# Altium schematic symbol library SFH213FA.SchLib: 1 symbol
Pins are listed as number, name and electrical type; pins without a type are passive.

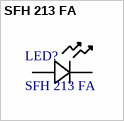
[diagram p0: symbol SFH 213 FA]

## SFH 213 FA
designator LED?
Description; Manufacturer_Name: ams OSRAM; Copyright: Copyright (C) 2026 Ultra Librarian. All rights reserved.; Manufacturer_Part_Number: SFH 213 FA
footprint LED_SFH 213 FA_OSR
pins: 1, 2